# Altium footprint library ICs_VendorSpecific.PcbLib: 247 footprints (part 8 of 19)
Each footprint in its own frame and in the unit in brackets; x right, y up, seen from the top. Pads: shape width x height; smd on the part's side, far side on the other; paste and mask are expansions set on the pad; w line width, h text height; cw(c..) or ccw(c..) is an arc to the next point about the centre after c.
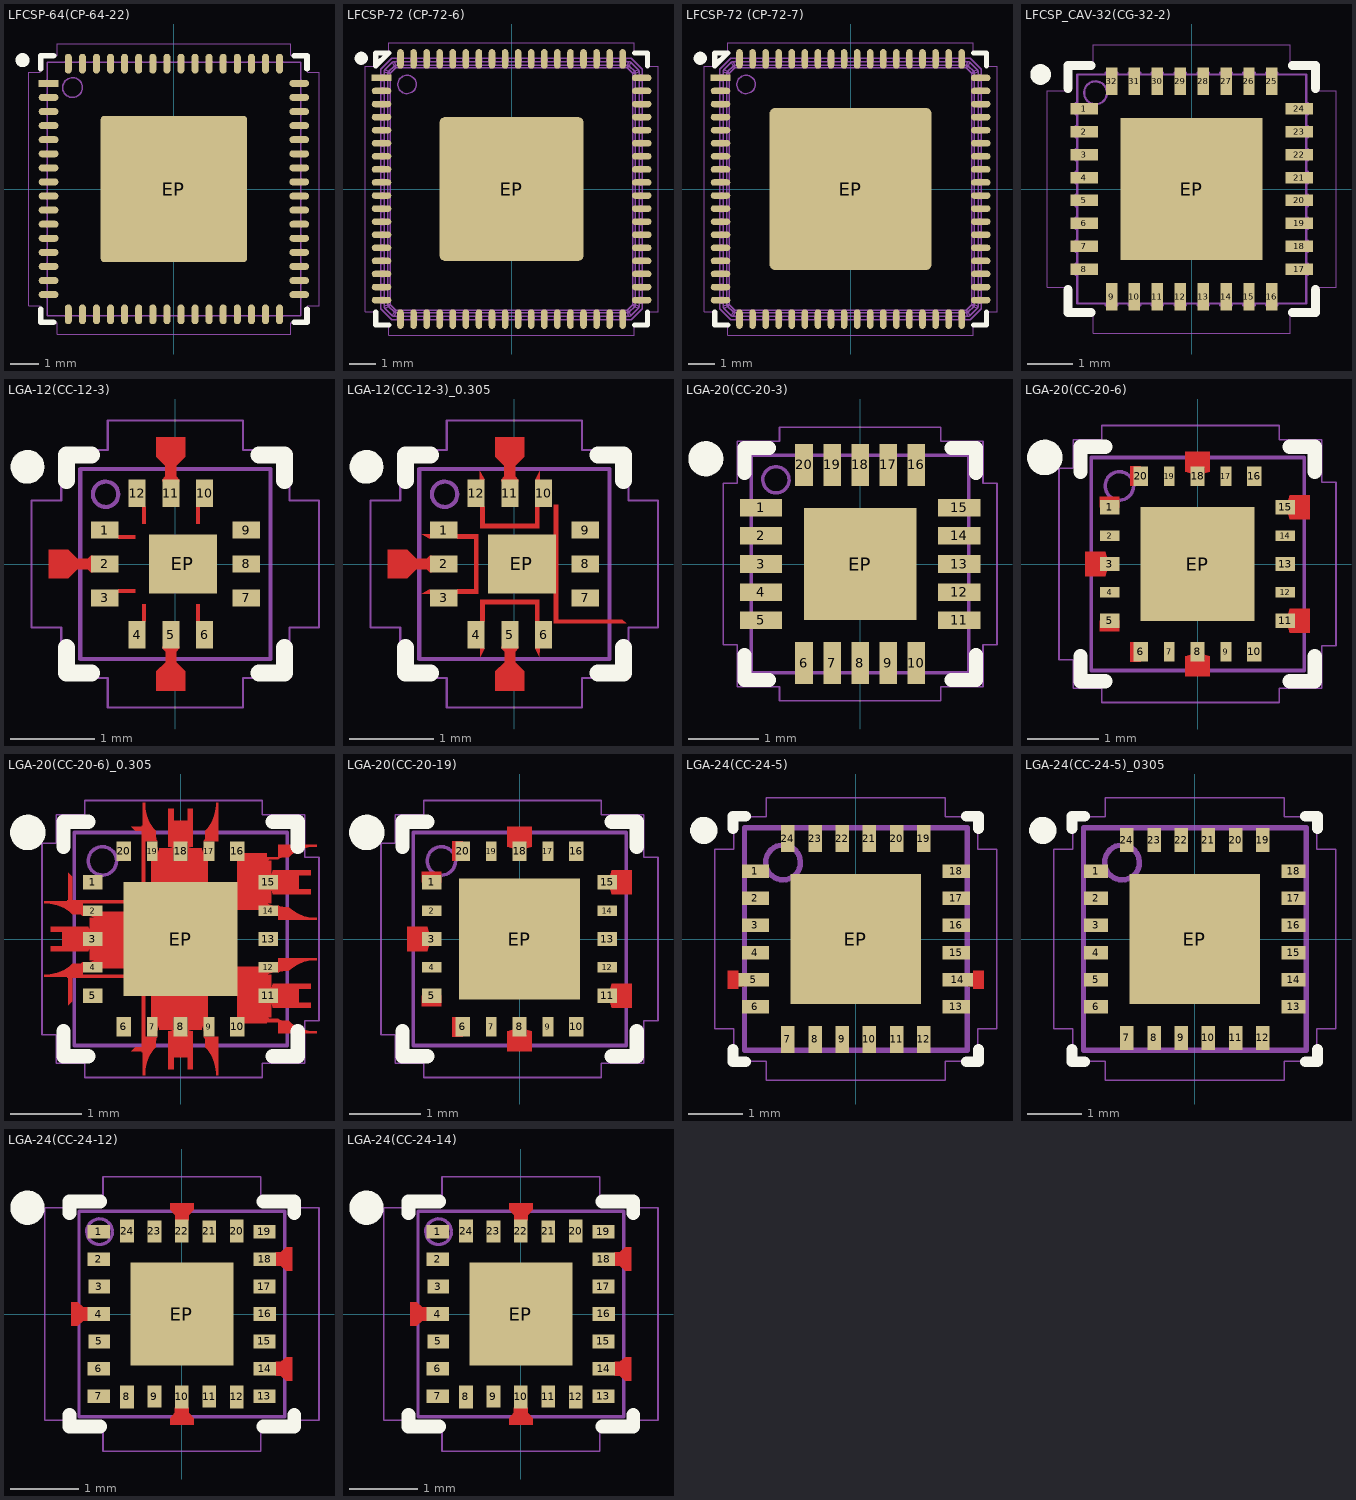
[diagram p7: the footprints below, top view; thin cyan lines are the x and y axes]

## LFCSP-64(CP-64-22) [mm] "QFN, 64-Leads, Body 9x9mm, Pitch 0.50mm, Thermal Pad 5.21x5.21mm"
height 0.75
pads (65):
  rect 0.7x0.25 smd paste+0 mask+0.05: 1(-4.45,3.75)
  oval 0.7x0.25 smd paste+0 mask+0.05: 2(-4.45,3.25) 3(-4.45,2.75) 4(-4.45,2.25) 5(-4.45,1.75) 6(-4.45,1.25) 7(-4.45,0.75) 8(-4.45,0.25) 9(-4.45,-0.25) 10(-4.45,-0.75) 11(-4.45,-1.25) 12(-4.45,-1.75) 13(-4.45,-2.25) 14(-4.45,-2.75) 15(-4.45,-3.25) 16(-4.45,-3.75) 33(4.45,-3.75) 34(4.45,-3.25) 35(4.45,-2.75) 36(4.45,-2.25) 37(4.45,-1.75) 38(4.45,-1.25) 39(4.45,-0.75) 40(4.45,-0.25) 41(4.45,0.25) 42(4.45,0.75) 43(4.45,1.25) 44(4.45,1.75) 45(4.45,2.25) 46(4.45,2.75) 47(4.45,3.25) 48(4.45,3.75)
  oval 0.25x0.7 smd paste+0 mask+0.05: 17(-3.75,-4.45) 18(-3.25,-4.45) 19(-2.75,-4.45) 20(-2.25,-4.45) 21(-1.75,-4.45) 22(-1.25,-4.45) 23(-0.75,-4.45) 24(-0.25,-4.45) 25(0.25,-4.45) 26(0.75,-4.45) 27(1.25,-4.45) 28(1.75,-4.45) 29(2.25,-4.45) 30(2.75,-4.45) 31(3.25,-4.45) 32(3.75,-4.45) 49(3.75,4.45) 50(3.25,4.45) 51(2.75,4.45) 52(2.25,4.45) 53(1.75,4.45) 54(1.25,4.45) 55(0.75,4.45) 56(0.25,4.45) 57(-0.25,4.45) 58(-0.75,4.45) 59(-1.25,4.45) 60(-1.75,4.45) 61(-2.25,4.45) 62(-2.75,4.45) 63(-3.25,4.45) 64(-3.75,4.45)
  rrect5% 5.2x5.2 smd paste-50 mask+0.05: EP(0,0)
Top Overlay:
  circle w0.25: c-5.375,4.575 r0.125
  lines w0.2: -4.725,-4.275 -4.725,-4.725 -4.275,-4.725 ; -4.725,4.275 -4.725,4.725 -4.275,4.725 ; 4.275,-4.725 4.725,-4.725 4.725,-4.275 ; 4.275,4.725 4.725,4.725 4.725,4.275
Top Paste:
  region: -2.45,2.45 -2.45,1.45 -1.45,1.45 -1.45,2.45
  region: -2.45,-1.45 -2.45,-2.45 -1.45,-2.45 -1.45,-1.45
  region: -1.15,-1.45 -1.15,-2.45 -0.15,-2.45 -0.15,-1.45
  region: 0.15,-1.45 0.15,-2.45 1.15,-2.45 1.15,-1.45
  region: 1.45,-1.45 1.45,-2.45 2.45,-2.45 2.45,-1.45
  region: -1.15,2.45 -1.15,1.45 -0.15,1.45 -0.15,2.45
  region: 0.15,2.45 0.15,1.45 1.15,1.45 1.15,2.45
  region: 1.45,2.45 1.45,1.45 2.45,1.45 2.45,2.45
  region: -2.45,1.15 -2.45,0.15 -1.45,0.15 -1.45,1.15
  region: -1.15,1.15 -1.15,0.15 -0.15,0.15 -0.15,1.15
  region: 0.15,1.15 0.15,0.15 1.15,0.15 1.15,1.15
  region: 1.45,1.15 1.45,0.15 2.45,0.15 2.45,1.15
  region: -2.45,-0.15 -2.45,-1.15 -1.45,-1.15 -1.45,-0.15
  region: -1.15,-0.15 -1.15,-1.15 -0.15,-1.15 -0.15,-0.15
  region: 0.15,-0.15 0.15,-1.15 1.15,-1.15 1.15,-0.15
  region: 1.45,-0.15 1.45,-1.15 2.45,-1.15 2.45,-0.15
Top Courtyard:
  lines w0.025: -5.15,-4.15 -4.75,-4.15 -4.75,-4.75 -4.15,-4.75 -4.15,-5.15 4.15,-5.15 4.15,-4.75 4.75,-4.75 4.75,-4.15 5.15,-4.15 5.15,4.15 4.75,4.15 4.75,4.75 4.15,4.75 4.15,5.15 -4.15,5.15 -4.15,4.75 -4.75,4.75 -4.75,4.15 -5.15,4.15 -5.15,-4.15
Top Assembly:
  drawing of 197 lines, arcs and shapes, not listed
  text ".Designator" at -6.763,-0.679 h3
3D body "LFCSP_64_AD9912_CP_64_22.x_t": height 0.77, standoff 0, extent -4.52,-4.52 4.52,4.52

## LFCSP-72 (CP-72-6) [mm] "LFCSP, 72-Leads, Body 10x10mm, Pitch 0.50mm, Thermal Pad 5.30x5.30mm. Compliant to JEDEC standards MO-220-VNND-4"
height 1
pads (73):
  rect 0.75x0.25 smd mask+0.05: 1(-4.975,4.25)
  oval 0.75x0.25 smd mask+0.05: 2(-4.975,3.75) 3(-4.975,3.25) 4(-4.975,2.75) 5(-4.975,2.25) 6(-4.975,1.75) 7(-4.975,1.25) 8(-4.975,0.75) 9(-4.975,0.25) 10(-4.975,-0.25) 11(-4.975,-0.75) 12(-4.975,-1.25) 13(-4.975,-1.75) 14(-4.975,-2.25) 15(-4.975,-2.75) 16(-4.975,-3.25) 17(-4.975,-3.75) 18(-4.975,-4.25) 37(4.975,-4.25) 38(4.975,-3.75) 39(4.975,-3.25) 40(4.975,-2.75) 41(4.975,-2.25) 42(4.975,-1.75) 43(4.975,-1.25) 44(4.975,-0.75) 45(4.975,-0.25) 46(4.975,0.25) 47(4.975,0.75) 48(4.975,1.25) 49(4.975,1.75) 50(4.975,2.25) 51(4.975,2.75) 52(4.975,3.25) 53(4.975,3.75) 54(4.975,4.25)
  oval 0.25x0.75 smd mask+0.05: 19(-4.25,-4.975) 20(-3.75,-4.975) 21(-3.25,-4.975) 22(-2.75,-4.975) 23(-2.25,-4.975) 24(-1.75,-4.975) 25(-1.25,-4.975) 26(-0.75,-4.975) 27(-0.25,-4.975) 28(0.25,-4.975) 29(0.75,-4.975) 30(1.25,-4.975) 31(1.75,-4.975) 32(2.25,-4.975) 33(2.75,-4.975) 34(3.25,-4.975) 35(3.75,-4.975) 36(4.25,-4.975) 55(4.25,4.975) 56(3.75,4.975) 57(3.25,4.975) 58(2.75,4.975) 59(2.25,4.975) 60(1.75,4.975) 61(1.25,4.975) 62(0.75,4.975) 63(0.25,4.975) 64(-0.25,4.975) 65(-0.75,4.975) 66(-1.25,4.975) 67(-1.75,4.975) 68(-2.25,4.975) 69(-2.75,4.975) 70(-3.25,4.975) 71(-3.75,4.975) 72(-4.25,4.975)
  rrect7% 5.5x5.5 smd paste-4 mask+0.05: EP(0,0)
Top Overlay:
  circle w0.25: c-5.75,5 r0.125
  lines w0.2: -5.2,-4.7 -5.2,-5.2 -4.7,-5.2 ; 4.7,-5.2 5.2,-5.2 5.2,-4.7 ; 4.7,5.2 5.2,5.2 5.2,4.7 ; -5.2,4.7 -5.2,5.2 -4.7,5.2 -5.2,4.7
Top Paste:
  region: 2.45,-1.45 1.45,-1.45 1.45,-2.45 2.45,-2.45
  region: 1.15,-1.45 0.15,-1.45 0.15,-2.45 1.15,-2.45
  region: -0.15,-1.45 -1.15,-1.45 -1.15,-2.45 -0.15,-2.45
  region: -1.45,-1.45 -2.45,-1.45 -2.45,-2.45 -1.45,-2.45
  region: 2.45,2.45 1.45,2.45 1.45,1.45 2.45,1.45
  region: 1.15,2.45 0.15,2.45 0.15,1.45 1.15,1.45
  region: -0.15,2.45 -1.15,2.45 -1.15,1.45 -0.15,1.45
  region: -1.45,2.45 -2.45,2.45 -2.45,1.45 -1.45,1.45
  region: 2.45,1.15 1.45,1.15 1.45,0.15 2.45,0.15
  region: 1.15,1.15 0.15,1.15 0.15,0.15 1.15,0.15
  region: -0.15,1.15 -1.15,1.15 -1.15,0.15 -0.15,0.15
  region: -1.45,1.15 -2.45,1.15 -2.45,0.15 -1.45,0.15
  region: 2.45,-0.15 1.45,-0.15 1.45,-1.15 2.45,-1.15
  region: -1.45,-0.15 -2.45,-0.15 -2.45,-1.15 -1.45,-1.15
  region: -0.15,-0.15 -1.15,-0.15 -1.15,-1.15 -0.15,-1.15
  region: 1.15,-0.15 0.15,-0.15 0.15,-1.15 1.15,-1.15
Top Courtyard:
  lines w0.025: -5.6,-4.7 -5.6,4.7 -5.2,4.7 -5.2,5.2 -4.7,5.2 -4.7,5.6 4.7,5.6 4.7,5.2 5.2,5.2 5.2,4.7 5.6,4.7 5.6,-4.7 5.2,-4.7 5.2,-5.2 4.7,-5.2 4.7,-5.6 -4.7,-5.6 -4.7,-5.2 -5.2,-5.2 -5.2,-4.7 -5.6,-4.7
Top Assembly:
  drawing of 369 lines, arcs and shapes, not listed
  text ".Designator" at -6.763,-0.679 h3
3D body "LFCSP-72(CP-72-6)_X_T.x_t": height 1.04, standoff 0, extent -5.005,-5.005 5.005,5.005

## LFCSP-72 (CP-72-7) [mm] "LFCSP, 72-Leads, Body 10x10mm, Pitch 0.50mm, Thermal Pad 5.30x5.30mm. Compliant to JEDEC standards MO-220-VNND-4"
height 1
pads (73):
  rect 0.75x0.25 smd mask+0.05: 1(-4.975,4.25)
  oval 0.75x0.25 smd mask+0.05: 2(-4.975,3.75) 3(-4.975,3.25) 4(-4.975,2.75) 5(-4.975,2.25) 6(-4.975,1.75) 7(-4.975,1.25) 8(-4.975,0.75) 9(-4.975,0.25) 10(-4.975,-0.25) 11(-4.975,-0.75) 12(-4.975,-1.25) 13(-4.975,-1.75) 14(-4.975,-2.25) 15(-4.975,-2.75) 16(-4.975,-3.25) 17(-4.975,-3.75) 18(-4.975,-4.25) 37(4.975,-4.25) 38(4.975,-3.75) 39(4.975,-3.25) 40(4.975,-2.75) 41(4.975,-2.25) 42(4.975,-1.75) 43(4.975,-1.25) 44(4.975,-0.75) 45(4.975,-0.25) 46(4.975,0.25) 47(4.975,0.75) 48(4.975,1.25) 49(4.975,1.75) 50(4.975,2.25) 51(4.975,2.75) 52(4.975,3.25) 53(4.975,3.75) 54(4.975,4.25)
  oval 0.25x0.75 smd mask+0.05: 19(-4.25,-4.975) 20(-3.75,-4.975) 21(-3.25,-4.975) 22(-2.75,-4.975) 23(-2.25,-4.975) 24(-1.75,-4.975) 25(-1.25,-4.975) 26(-0.75,-4.975) 27(-0.25,-4.975) 28(0.25,-4.975) 29(0.75,-4.975) 30(1.25,-4.975) 31(1.75,-4.975) 32(2.25,-4.975) 33(2.75,-4.975) 34(3.25,-4.975) 35(3.75,-4.975) 36(4.25,-4.975) 55(4.25,4.975) 56(3.75,4.975) 57(3.25,4.975) 58(2.75,4.975) 59(2.25,4.975) 60(1.75,4.975) 61(1.25,4.975) 62(0.75,4.975) 63(0.25,4.975) 64(-0.25,4.975) 65(-0.75,4.975) 66(-1.25,4.975) 67(-1.75,4.975) 68(-2.25,4.975) 69(-2.75,4.975) 70(-3.25,4.975) 71(-3.75,4.975) 72(-4.25,4.975)
  rrect7% 6.2x6.2 smd paste-4 mask+0.05: EP(0,0)
Top Overlay:
  circle w0.25: c-5.75,5 r0.125
  lines w0.2: -5.2,-4.7 -5.2,-5.2 -4.7,-5.2 ; 4.7,-5.2 5.2,-5.2 5.2,-4.7 ; 4.7,5.2 5.2,5.2 5.2,4.7 ; -5.2,4.7 -4.7,5.2 -5.2,5.2 -5.2,4.7
Top Paste:
  region: 2.6,-1.8 1.8,-1.8 1.8,-2.6 2.6,-2.6
  region: -1.8,-1.8 -2.6,-1.8 -2.6,-2.6 -1.8,-2.6
  region: -0.7,-1.8 -1.5,-1.8 -1.5,-2.6 -0.7,-2.6
  region: 0.4,-1.8 -0.4,-1.8 -0.4,-2.6 0.4,-2.6
  region: 1.5,-1.8 0.7,-1.8 0.7,-2.6 1.5,-2.6
  region: -1.8,2.6 -2.6,2.6 -2.6,1.8 -1.8,1.8
  region: -0.7,2.6 -1.5,2.6 -1.5,1.8 -0.7,1.8
  region: 2.6,2.6 1.8,2.6 1.8,1.8 2.6,1.8
  region: 0.4,2.6 -0.4,2.6 -0.4,1.8 0.4,1.8
  region: 1.5,2.6 0.7,2.6 0.7,1.8 1.5,1.8
  region: -1.8,1.5 -2.6,1.5 -2.6,0.7 -1.8,0.7
  region: -0.7,1.5 -1.5,1.5 -1.5,0.7 -0.7,0.7
  region: 2.6,1.5 1.8,1.5 1.8,0.7 2.6,0.7
  region: 0.4,1.5 -0.4,1.5 -0.4,0.7 0.4,0.7
  region: 1.5,1.5 0.7,1.5 0.7,0.7 1.5,0.7
  region: -1.8,0.4 -2.6,0.4 -2.6,-0.4 -1.8,-0.4
  region: -0.7,0.4 -1.5,0.4 -1.5,-0.4 -0.7,-0.4
  region: 2.6,0.4 1.8,0.4 1.8,-0.4 2.6,-0.4
  region: 2.6,-0.7 1.8,-0.7 1.8,-1.5 2.6,-1.5
  region: -1.8,-0.7 -2.6,-0.7 -2.6,-1.5 -1.8,-1.5
  region: -0.7,-0.7 -1.5,-0.7 -1.5,-1.5 -0.7,-1.5
  region: 0.4,0.4 -0.4,0.4 -0.4,-0.4 0.4,-0.4
  region: 1.5,0.4 0.7,0.4 0.7,-0.4 1.5,-0.4
  region: 0.4,-0.7 -0.4,-0.7 -0.4,-1.5 0.4,-1.5
  region: 1.5,-0.7 0.7,-0.7 0.7,-1.5 1.5,-1.5
Top Courtyard:
  lines w0.025: -5.6,-4.7 -5.2,-4.7 -5.2,-5.2 -4.7,-5.2 -4.7,-5.6 4.7,-5.6 4.7,-5.2 5.2,-5.2 5.2,-4.7 5.6,-4.7 5.6,4.7 5.2,4.7 5.2,5.2 4.7,5.2 4.7,5.6 -4.7,5.6 -4.7,5.2 -5.2,5.2 -5.2,4.7 -5.6,4.7 -5.6,-4.7
Top Assembly:
  drawing of 369 lines, arcs and shapes, not listed
  text ".Designator" at -6.763,-0.679 h3
3D body "LFCSP-72(CP-72-7).x_t": height 1.04, standoff 0, extent -5.005,-5.005 5.005,5.005

## LFCSP_CAV-32(CG-32-2) [mm] "QFN, 32-Leads, Body 5x5mm, Pitch 0.50mm, Thermal Pad 3.10x3.10mm"
height 1.35
pads (33):
  rect 0.6x0.25 smd mask+0.07: 1(-2.345,1.75) 2(-2.345,1.25) 3(-2.345,0.75) 4(-2.345,0.25) 5(-2.345,-0.25) 6(-2.345,-0.75) 7(-2.345,-1.25) 8(-2.345,-1.75) 17(2.35,-1.75) 18(2.35,-1.25) 19(2.35,-0.75) 20(2.35,-0.25) 21(2.35,0.25) 22(2.35,0.75) 23(2.35,1.25) 24(2.35,1.75)
  rect 0.25x0.6 smd mask+0.07: 9(-1.75,-2.35) 10(-1.25,-2.35) 11(-0.75,-2.35) 12(-0.25,-2.35) 13(0.25,-2.35) 14(0.75,-2.35) 15(1.25,-2.35) 16(1.75,-2.35) 25(1.75,2.35) 26(1.25,2.35) 27(0.75,2.35) 28(0.25,2.35) 29(-0.25,2.35) 30(-0.75,2.35) 31(-1.25,2.35) 32(-1.75,2.35)
  rect 3.1x3.1 smd paste-5 mask+0.08: EP(0,0)
Top Overlay:
  circle w0.25: c-3.3,2.5 r0.1
  lines w0.2: -2.7,-2.2 -2.7,-2.7 -2.2,-2.7 ; -2.7,2.2 -2.7,2.7 -2.2,2.7 ; 2.2,-2.7 2.7,-2.7 2.7,-2.2 ; 2.2,2.7 2.7,2.7 2.7,2.2
Top Paste:
  region: 0.6,-0.6 0.6,-1.4 1.4,-1.4 1.4,-0.6
  region: -0.4,-0.6 -0.4,-1.4 0.4,-1.4 0.4,-0.6
  region: -1.4,-0.6 -1.4,-1.4 -0.6,-1.4 -0.6,-0.6
  rectangle: 0.6,-0.4 1.4,0.4
  rectangle: 0.6,0.6 1.4,1.4
  rectangle: -0.4,0.6 0.4,1.4
  rectangle: -1.4,0.6 -0.6,1.4
  rectangle: -1.4,-0.4 -0.6,0.4
  rectangle: -0.4,-0.4 0.4,0.4
Top Courtyard:
  lines w0.025: -3.15,-2.15 -2.7,-2.15 -2.7,-2.7 -2.15,-2.7 -2.15,-3.15 2.15,-3.15 2.15,-2.7 2.7,-2.7 2.7,-2.15 3.15,-2.15 3.15,2.15 2.7,2.15 2.7,2.7 2.15,2.7 2.15,3.15 -2.15,3.15 -2.15,2.7 -2.7,2.7 -2.7,2.15 -3.15,2.15 -3.15,-2.15
Top Assembly:
  drawing of 165 lines, arcs and shapes, not listed
  text ".Designator" at -3.378,-0.339 h1.5
3D body "CG-32-2([LFCSP_CAV32).x_t": height 1.29, standoff 0, extent -2.535,-2.535 2.535,2.535

## LGA-12(CC-12-3) [mm] "LGA, 12-Leads, Body 2.25x2.25mm, Pitch 0.40mm, Thermal Pad 0.7x0.8mm"
height 0.75
pads (13):
  rect 0.325x0.2 smd paste+0.02 mask+0.04: 1(-0.837,0.4) 2(-0.837,0) 3(-0.837,-0.4) 7(0.837,-0.4) 8(0.837,0) 9(0.837,0.4)
  rect 0.2x0.325 smd paste+0.02 mask+0.04: 4(-0.453,-0.837) 5(-0.053,-0.837) 6(0.347,-0.837) 10(0.347,0.837) 11(-0.053,0.837) 12(-0.453,0.837)
  rect 0.8x0.7 smd paste-5 mask+0.07: EP(0.09,0)
Top Layer:
  region: -1.036,0 -1.036,-0.063 -1.163,-0.063 -1.163,0
  region: -1.036,0 -1.036,0.063 -1.163,0.063 -1.163,0
  region: -1,0.1 -1.036,0.063 -1.163,0.063 -1.163,-0.063 -1.036,-0.063 -1,-0.1 -0.981,-0.1 -0.981,0.1
  region: -1.163,0.063 -1.27,0.17 -1.5,0.17 -1.5,-0.17 -1.27,-0.17 -1.163,-0.063
  region: 0.047,0.999 0.01,1.036 0.01,1.163 -0.116,1.163 -0.116,1.036 -0.153,0.999 -0.153,0.98 0.047,0.98
  region: 0.01,1.163 0.117,1.27 0.117,1.5 -0.223,1.5 -0.223,1.269 -0.116,1.163
  region: -0.153,-1 -0.116,-1.036 -0.116,-1.163 0.01,-1.163 0.01,-1.036 0.047,-1 0.047,-0.981 -0.153,-0.981
  region: -0.116,-1.163 -0.223,-1.27 -0.223,-1.5 0.117,-1.5 0.117,-1.27 0.01,-1.163
  pour cut-out: -0.393,-0.675 -0.353,-0.675 -0.353,-0.475 -0.393,-0.475
  pour cut-out: 0.287,-0.675 0.247,-0.675 0.247,-0.475 0.287,-0.475
  pour cut-out: -0.675,-0.34 -0.675,-0.3 -0.475,-0.3 -0.475,-0.34
  pour cut-out: -0.675,0.34 -0.675,0.3 -0.475,0.3 -0.475,0.34
  pour cut-out: -0.393,0.675 -0.353,0.675 -0.353,0.475 -0.393,0.475
  pour cut-out: 0.287,0.675 0.247,0.675 0.247,0.475 0.287,0.475
Top Overlay:
  circle w0.2: c-1.75,1.15 r0.1
  lines w0.2: -1.29,-0.99 -1.29,-1.29 -0.99,-1.29 ; -1.29,0.99 -1.29,1.29 -0.99,1.29 ; 0.99,-1.29 1.29,-1.29 1.29,-0.99 ; 0.99,1.29 1.29,1.29 1.29,0.99
Top Paste:
  region: 0.495,0.09 0.185,0.09 0.185,0.35 0.495,0.35
  region: 0.495,-0.09 0.185,-0.09 0.185,-0.35 0.495,-0.35
  region: -0.315,0.09 -0.005,0.09 -0.005,0.35 -0.315,0.35
  region: -0.31,-0.09 0,-0.09 0,-0.35 -0.31,-0.35
Top Solder:
  region: -0.313,1.036 -0.313,1.27 -0.593,1.27 -0.593,1.036
  region: 0.087,1.036 0.087,1.27 -0.193,1.27 -0.193,1.036
  region: 0.487,1.036 0.487,1.27 0.207,1.27 0.207,1.036
  region: 1.036,0.26 1.27,0.26 1.27,0.54 1.036,0.54
  region: 1.036,-0.14 1.27,-0.14 1.27,0.14 1.036,0.14
  region: 1.036,-0.54 1.27,-0.54 1.27,-0.26 1.036,-0.26
  region: 0.207,-1.036 0.207,-1.27 0.487,-1.27 0.487,-1.036
  region: -0.193,-1.036 -0.193,-1.27 0.087,-1.27 0.087,-1.036
  region: -0.593,-1.036 -0.593,-1.27 -0.313,-1.27 -0.313,-1.036
  region: -1.036,-0.26 -1.27,-0.26 -1.27,-0.54 -1.036,-0.54
  region: -1.036,0.14 -1.27,0.14 -1.27,-0.14 -1.036,-0.14
  region: -1.036,0.54 -1.27,0.54 -1.27,0.26 -1.036,0.26
Top Courtyard:
  lines w0.025: -1.7,-0.75 -1.35,-0.75 -1.35,-1.35 -0.8,-1.35 -0.8,-1.7 0.8,-1.7 0.8,-1.35 1.35,-1.35 1.35,-0.75 1.7,-0.75 1.7,0.75 1.35,0.75 1.35,1.35 0.8,1.35 0.8,1.7 -0.8,1.7 -0.8,1.35 -1.35,1.35 -1.35,0.75 -1.7,0.75 -1.7,-0.75
Top Assembly:
  circle w0.05: c-0.825,0.825 r0.15
  lines w0.05: -1.125,-1.125 -1.125,1.125 1.125,1.125 1.125,-1.125 -1.125,-1.125
  text ".Designator" at -2.815,-0.283 h1.25
3D body "CC-12-3(LGA12).x_t": height 0.76, standoff 0, extent -1.125,-1.125 1.125,1.125

## LGA-12(CC-12-3)_0.305 [mm] "LGA, 12-Leads, Body 2.25x2.25mm, Pitch 0.40mm, Thermal Pad 0.7x0.8mm"
height 0.75
pads (13):
  rect 0.325x0.2 smd paste+0 mask+0.04: 1(-0.837,0.4) 2(-0.837,0) 3(-0.837,-0.4) 7(0.837,-0.4) 8(0.837,0) 9(0.837,0.4)
  rect 0.2x0.325 smd paste+0 mask+0.04: 4(-0.453,-0.837) 5(-0.053,-0.837) 6(0.347,-0.837) 10(0.347,0.837) 11(-0.053,0.837) 12(-0.453,0.837)
  rect 0.8x0.7 smd paste-5 mask+0.07: EP(0.09,0)
Top Layer:
  region: -1,-0.3 -1.095,-0.35 -1,-0.351
  region: -1,0.3 -1.095,0.35 -1,0.351
  region: -0.353,-0.999 -0.403,-1.095 -0.404,-0.999
  region: 0.247,-0.999 0.297,-1.095 0.298,-0.999
  region: -0.407,1.098 -0.407,0.999 -0.353,0.999 -0.403,1.094
  region: 0.301,1.098 0.301,0.999 0.247,0.999 0.297,1.094
  region: -0.674,0.35 -0.425,0.35 -0.425,-0.35 -0.674,-0.35 -0.674,-0.34 -0.475,-0.34 -0.475,0.34 -0.674,0.34
  region: -0.403,-0.674 -0.403,-0.424 0.297,-0.424 0.297,-0.674 0.287,-0.674 0.287,-0.475 -0.393,-0.475 -0.393,-0.674
  region: -0.403,0.674 -0.403,0.424 0.297,0.424 0.297,0.674 0.287,0.674 0.287,0.475 -0.393,0.475 -0.393,0.674
  region: 1.322,-0.701 0.468,-0.701 0.467,-0.7 0.467,0.7 0.517,0.7 0.517,-0.657 1.279,-0.657
  pour cut-out: -0.353,0.675 -0.353,0.475 -0.393,0.475 -0.393,0.675
  pour cut-out: 0.247,0.675 0.287,0.675 0.287,0.475 0.247,0.475
  pour cut-out: 0.287,-0.475 0.287,-0.674 0.247,-0.674 0.247,-0.675 0.247,-0.475
  pour cut-out: -0.353,-0.475 -0.353,-0.675 -0.393,-0.675 -0.393,-0.475
  pour cut-out: -0.674,-0.34 -0.674,-0.3 -0.675,-0.3 -0.475,-0.3 -0.475,-0.34
  pour cut-out: -0.675,0.3 -0.675,0.34 -0.475,0.34 -0.475,0.3
  region: -0.153,-0.98 -0.153,-0.999 -0.116,-1.036 -0.116,-1.163 -0.223,-1.27 -0.223,-1.5 0.117,-1.5 0.117,-1.269 0.01,-1.163 0.01,-1.036 0.047,-0.999 0.047,-0.98
  region: -1.5,0.17 -1.5,-0.17 -1.27,-0.17 -1.163,-0.063 -1.036,-0.063 -1,-0.1 -0.981,-0.1 -0.981,0.1 -1,0.1 -1.036,0.063 -1.163,0.063 -1.27,0.17
  region: -0.153,0.98 -0.153,0.999 -0.116,1.036 -0.116,1.163 -0.223,1.269 -0.223,1.5 0.117,1.5 0.117,1.27 0.01,1.163 0.01,1.036 0.047,0.999 0.047,0.98
Top Overlay:
  circle w0.2: c-1.75,1.15 r0.1
  lines w0.2: -1.29,-0.99 -1.29,-1.29 -0.99,-1.29 ; -1.29,0.99 -1.29,1.29 -0.99,1.29 ; 0.99,-1.29 1.29,-1.29 1.29,-0.99 ; 0.99,1.29 1.29,1.29 1.29,0.99
Top Paste:
  region: -0.31,0.1 -0.01,0.1 -0.01,0.35 -0.31,0.35
  region: 0.49,0.1 0.19,0.1 0.19,0.35 0.49,0.35
  region: 0.49,-0.1 0.19,-0.1 0.19,-0.35 0.49,-0.35
  region: -0.31,-0.1 -0.01,-0.1 -0.01,-0.35 -0.31,-0.35
Top Courtyard:
  lines w0.025: -1.7,-0.75 -1.35,-0.75 -1.35,-1.35 -0.8,-1.35 -0.8,-1.7 0.8,-1.7 0.8,-1.35 1.35,-1.35 1.35,-0.75 1.7,-0.75 1.7,0.75 1.35,0.75 1.35,1.35 0.8,1.35 0.8,1.7 -0.8,1.7 -0.8,1.35 -1.35,1.35 -1.35,0.75 -1.7,0.75 -1.7,-0.75
Top Assembly:
  circle w0.05: c-0.825,0.825 r0.15
  lines w0.05: -1.125,-1.125 -1.125,1.125 1.125,1.125 1.125,-1.125 -1.125,-1.125
  text ".Designator" at -2.815,-0.282 h1.25
3D body "CC-12-3(LGA12).x_t": height 0.76, standoff 0, extent -1.125,-1.125 1.125,1.125

## LGA-20(CC-20-3) [mm] "LGA, 20-Leads, Body 3x3mm, Pitch 0.40mm, Thermal Pad 1.60x1.60mm"
height 0.726
pads (21):
  rect 0.6x0.25 smd mask+0.03: 1(-1.412,0.8) 2(-1.412,0.4) 3(-1.412,0) 4(-1.412,-0.4) 5(-1.412,-0.8) 11(1.412,-0.8) 12(1.412,-0.4) 13(1.412,0) 14(1.412,0.4) 15(1.412,0.8)
  rect 0.25x0.6 smd mask+0.03: 6(-0.8,-1.412) 7(-0.4,-1.412) 8(0,-1.412) 9(0.4,-1.412) 10(0.8,-1.412) 16(0.8,1.412) 17(0.4,1.412) 18(0,1.412) 19(-0.4,1.412) 20(-0.8,1.412)
  rect 1.6x1.6 smd paste-4 mask+0.05: EP(0,0)
Top Overlay:
  circle w0.25: c-2.2,1.5 r0.125
  lines w0.2: -1.65,-1.3 -1.65,-1.65 -1.3,-1.65 ; -1.65,1.3 -1.65,1.65 -1.3,1.65 ; 1.3,-1.65 1.65,-1.65 1.65,-1.3 ; 1.3,1.65 1.65,1.65 1.65,1.3
Top Paste:
  rectangle: -0.7,0.1 -0.1,0.7
  rectangle: 0.1,0.1 0.7,0.7
  rectangle: -0.7,-0.7 -0.1,-0.1
  rectangle: 0.1,-0.7 0.7,-0.1
Top Courtyard:
  lines w0.025: -1.95,-1.15 -1.95,1.15 -1.75,1.15 -1.75,1.75 -1.15,1.75 -1.15,1.95 1.15,1.95 1.15,1.75 1.75,1.75 1.75,1.15 1.95,1.15 1.95,-1.15 1.75,-1.15 1.75,-1.75 1.15,-1.75 1.15,-1.95 -1.15,-1.95 -1.15,-1.75 -1.75,-1.75 -1.75,-1.15 -1.95,-1.15
Top Assembly:
  lines w0.05: -1.014,1.221 ccw(c-1.2,1.2) -1.013,1.19 ; -1.55,-1.55 1.55,-1.55 1.55,1.55 -1.55,1.55 -1.55,-1.55
  text ".Designator" at -4.511,-0.453 h2
3D body "CC-20-3(LGA20).x_t": height 0.73, standoff -0.01, extent -1.5,-1.5 1.5,1.5

## LGA-20(CC-20-6) [mm] "LGA, 20-Leads, Body 3x3mm, Pitch 0.40mm, Thermal Pad 1.50x1.50mm"
height 0.96
pads (21):
  rect 0.275x0.2 smd paste+0.01 mask+0.05: 1(-1.237,0.8) 3(-1.237,0) 5(-1.237,-0.8) 11(1.237,-0.8) 13(1.237,0) 15(1.237,0.8)
  rect 0.275x0.15 smd paste+0.01 mask+0.05: 2(-1.237,0.4) 4(-1.237,-0.4) 12(1.237,-0.4) 14(1.237,0.4)
  rect 0.2x0.275 smd paste+0.01 mask+0.05: 6(-0.8,-1.237) 8(0,-1.237) 10(0.8,-1.237) 16(0.8,1.237) 18(0,1.237) 20(-0.8,1.237)
  rect 0.15x0.275 smd paste+0.01 mask+0.05: 7(-0.4,-1.237) 9(0.4,-1.237) 17(0.4,1.237) 19(-0.4,1.237)
  rect 1.6x1.6 smd paste-4 mask+0.05: EP(0,0)
Top Layer:
  region: 1.58,0.689 1.354,0.689 1.354,0.921 1.58,0.921
  region: 1.58,-0.911 1.354,-0.911 1.354,-0.679 1.58,-0.679
  region: -0.111,-1.58 -0.111,-1.354 0.121,-1.354 0.121,-1.58
  region: -1.58,0.111 -1.354,0.111 -1.354,-0.121 -1.58,-0.121
  region: -0.099,1.58 -0.099,1.277 -0.17,1.301 -0.17,1.58
  region: 0.111,1.58 0.111,1.354 -0.121,1.354 -0.121,1.58
  region: 0.099,1.58 0.099,1.277 0.17,1.301 0.17,1.58
  region: 1.58,0.899 1.277,0.899 1.301,0.97 1.58,0.97
  region: 1.58,0.701 1.277,0.701 1.301,0.63 1.58,0.63
  region: 1.58,-0.701 1.277,-0.701 1.301,-0.63 1.58,-0.63
  region: 1.58,-0.899 1.277,-0.899 1.301,-0.97 1.58,-0.97
  region: 0.099,-1.58 0.099,-1.277 0.17,-1.301 0.17,-1.58
  region: -0.099,-1.58 -0.099,-1.277 -0.17,-1.301 -0.17,-1.58
  region: -1.58,-0.099 -1.277,-0.099 -1.301,-0.17 -1.58,-0.17
  region: -1.58,0.099 -1.277,0.099 -1.301,0.17 -1.58,0.17
  region: -1.1,0.8 -1.375,0.8 -1.375,0.947 -1.1,0.947
  region: -1.099,-0.8 -1.375,-0.8 -1.374,-0.947 -1.1,-0.947
  region: -0.8,-1.375 -0.8,-1.099 -0.947,-1.1 -0.947,-1.374
  region: -0.8,1.099 -0.8,1.375 -0.947,1.374 -0.947,1.1
Top Overlay:
  circle w0.25: c-2.15,1.5 r0.125
  lines w0.2: -1.65,-1.3 -1.65,-1.65 -1.3,-1.65 ; -1.65,1.3 -1.65,1.65 -1.3,1.65 ; 1.3,-1.65 1.65,-1.65 1.65,-1.3 ; 1.3,1.65 1.65,1.65 1.65,1.3
Top Paste:
  drawing of 90 lines, arcs and shapes, not listed
Top Solder:
  region: -1.354,0.525 -1.354,0.275 -1.65,0.275 -1.65,0.525
  region: -1.354,-0.65 -1.354,-0.95 -1.65,-0.95 -1.65,-0.65
  region: -1.354,-0.275 -1.354,-0.525 -1.65,-0.525 -1.65,-0.275
  region: -0.95,-1.354 -0.65,-1.354 -0.65,-1.65 -0.95,-1.65
  region: -0.525,-1.354 -0.275,-1.354 -0.275,-1.65 -0.525,-1.65
  region: -0.15,-1.354 0.15,-1.354 0.15,-1.65 -0.15,-1.65
  region: 0.275,-1.354 0.525,-1.354 0.525,-1.65 0.275,-1.65
  region: 0.65,-1.354 0.95,-1.354 0.95,-1.65 0.65,-1.65
  region: -1.354,0.95 -1.354,0.65 -1.65,0.65 -1.65,0.95
  region: -1.65,0.95 -1.65,1.15 -1.35,1.15 -1.35,0.95
  region: -1.65,-0.95 -1.65,-1.15 -1.35,-1.15 -1.35,-0.95
  region: -0.932,-1.65 -1.132,-1.65 -1.132,-1.35 -0.932,-1.35
  region: -1.354,0.15 -1.354,-0.15 -1.65,-0.15 -1.65,0.15
  region: 1.354,-0.15 1.354,0.15 1.65,0.15 1.65,-0.15
  region: 1.354,-0.95 1.354,-0.65 1.65,-0.65 1.65,-0.95
  region: 1.354,-0.525 1.354,-0.275 1.65,-0.275 1.65,-0.525
  region: 1.354,0.275 1.354,0.525 1.65,0.525 1.65,0.275
  region: 1.354,0.65 1.354,0.95 1.65,0.95 1.65,0.65
  region: 0.15,1.354 -0.15,1.354 -0.15,1.65 0.15,1.65
  region: 0.95,1.354 0.65,1.354 0.65,1.65 0.95,1.65
  region: -0.65,1.354 -0.95,1.354 -0.95,1.65 -0.65,1.65
  region: -0.932,1.65 -1.132,1.65 -1.132,1.35 -0.932,1.35
  region: 0.525,1.354 0.275,1.354 0.275,1.65 0.525,1.65
  region: -0.275,1.354 -0.525,1.354 -0.525,1.65 -0.275,1.65
Top Courtyard:
  lines w0.025: -1.95,-1.35 -1.75,-1.35 -1.75,-1.75 -1.35,-1.75 -1.35,-1.95 1.15,-1.95 1.15,-1.75 1.75,-1.75 1.75,-1.15 1.95,-1.15 1.95,1.15 1.75,1.15 1.75,1.75 1.15,1.75 1.15,1.95 -1.35,1.95 -1.35,1.75 -1.75,1.75 -1.75,1.35 -1.95,1.35 -1.95,-1.35
Top Assembly:
  circle w0.05: c-1.1,1.1 r0.2
  lines w0.05: -1.5,-1.5 1.5,-1.5 1.5,1.5 -1.5,1.5 -1.5,-1.5
  text ".Designator" at -4.511,-0.453 h2
3D body "CC-20-6(LGA20).x_t": height 0.86, standoff -0.01, extent -1.5,-1.5 1.5,1.5

## LGA-20(CC-20-6)_0.305 [mm] "LGA, 20-Leads, Body 3x3mm, Pitch 0.40mm, Thermal Pad 1.50x1.50mm"
height 0.96
pads (21):
  rect 0.275x0.2 smd paste+0.01 mask+0.05: 1(-1.237,0.8) 3(-1.237,0) 5(-1.237,-0.8) 11(1.237,-0.8) 13(1.237,0) 15(1.237,0.8)
  rect 0.275x0.15 smd paste+0.01 mask+0.05: 2(-1.237,0.4) 4(-1.237,-0.4) 12(1.237,-0.4) 14(1.237,0.4)
  rect 0.2x0.275 smd paste+0.01 mask+0.05: 6(-0.8,-1.237) 8(0,-1.237) 10(0.8,-1.237) 16(0.8,1.237) 18(0,1.237) 20(-0.8,1.237)
  rect 0.15x0.275 smd paste+0.01 mask+0.05: 7(-0.4,-1.237) 9(0.4,-1.237) 17(0.4,1.237) 19(-0.4,1.237)
  rect 1.6x1.6 smd paste-4 mask+0.05: EP(0,0)
Top Layer:
  region: 1.375,-1.33 1.375,-1.15 1.525,-1.15 1.562,-1.184 1.646,-1.239 1.739,-1.278 1.837,-1.298 1.887,-1.3 1.917,-1.3 1.917,-1.33 1.525,-1.33
  region: 0.325,-1.375 0.35,-1.374 0.355,-1.374 0.355,-1.445 0.35,-1.447 0.349,-1.438 0.345,-1.419 0.339,-1.4 0.33,-1.383
  region: -0.3,-1.217 -0.325,-1.217 -0.33,-1.217 -0.33,-1.288 -0.325,-1.29 -0.324,-1.28 -0.321,-1.261 -0.314,-1.243 -0.305,-1.225
  region: -0.325,-1.375 -0.35,-1.374 -0.355,-1.374 -0.355,-1.445 -0.35,-1.447 -0.349,-1.438 -0.346,-1.419 -0.339,-1.4 -0.33,-1.383
  region: 0.3,-1.217 0.325,-1.217 0.33,-1.217 0.33,-1.288 0.325,-1.29 0.324,-1.28 0.32,-1.261 0.314,-1.243 0.305,-1.225
  region: -0.53,-1.375 -0.35,-1.375 -0.35,-1.525 -0.384,-1.562 -0.44,-1.646 -0.478,-1.739 -0.498,-1.837 -0.5,-1.887 -0.5,-1.917 -0.53,-1.917 -0.53,-1.525
  region: 0.53,-1.375 0.35,-1.375 0.35,-1.525 0.384,-1.562 0.439,-1.646 0.478,-1.739 0.497,-1.837 0.5,-1.887 0.5,-1.917 0.53,-1.917 0.53,-1.525
  region: 1.375,-1.125 1.188,-1.125 1.188,-1.175 1.448,-1.175 1.448,-1.15 1.438,-1.149 1.419,-1.146 1.4,-1.139 1.383,-1.13
  region: 1.375,-0.27 1.375,-0.45 1.525,-0.45 1.562,-0.416 1.646,-0.36 1.739,-0.322 1.837,-0.302 1.887,-0.3 1.917,-0.3 1.917,-0.27 1.525,-0.27
  region: 1.217,-1.1 1.217,-1.125 1.217,-1.13 1.29,-1.13 1.29,-1.125 1.28,-1.124 1.261,-1.12 1.243,-1.114 1.225,-1.105
  region: 1.375,-0.475 1.374,-0.45 1.374,-0.445 1.445,-0.445 1.447,-0.45 1.438,-0.451 1.419,-0.455 1.4,-0.461 1.383,-0.47
  region: 1.217,-0.5 1.217,-0.475 1.217,-0.47 1.288,-0.47 1.29,-0.475 1.28,-0.476 1.261,-0.48 1.243,-0.486 1.225,-0.495
  region: 1.375,0.27 1.375,0.45 1.525,0.45 1.562,0.416 1.646,0.36 1.739,0.322 1.837,0.302 1.887,0.3 1.917,0.3 1.917,0.27 1.525,0.27
  region: 1.375,1.33 1.375,1.15 1.525,1.15 1.562,1.184 1.646,1.24 1.739,1.278 1.837,1.298 1.887,1.3 1.917,1.3 1.917,1.33 1.525,1.33
  region: 1.217,0.5 1.217,0.475 1.217,0.47 1.288,0.47 1.29,0.475 1.28,0.476 1.261,0.48 1.243,0.486 1.225,0.495
  region: 1.375,1.125 1.213,1.125 1.213,1.15 1.374,1.15 1.374,1.155 1.445,1.155 1.447,1.15 1.438,1.149 1.419,1.145 1.4,1.139 1.383,1.13
  region: 1.217,1.1 1.217,1.125 1.217,1.13 1.288,1.13 1.29,1.125 1.28,1.124 1.261,1.12 1.243,1.114 1.225,1.105
  region: 1.375,0.475 1.374,0.45 1.374,0.445 1.445,0.445 1.447,0.45 1.438,0.451 1.419,0.455 1.4,0.461 1.383,0.47
  region: 0.53,1.375 0.35,1.375 0.35,1.525 0.384,1.562 0.439,1.646 0.478,1.739 0.497,1.837 0.5,1.887 0.5,1.917 0.53,1.917 0.53,1.525
  region: -0.53,1.375 -0.35,1.375 -0.35,1.525 -0.384,1.562 -0.44,1.646 -0.478,1.739 -0.498,1.837 -0.5,1.887 -0.5,1.917 -0.53,1.917 -0.53,1.525
  region: 0.3,1.217 0.325,1.217 0.33,1.217 0.33,1.288 0.325,1.29 0.324,1.28 0.32,1.261 0.314,1.243 0.305,1.225
  region: -0.325,1.375 -0.35,1.374 -0.355,1.374 -0.355,1.445 -0.35,1.447 -0.349,1.438 -0.346,1.419 -0.339,1.4 -0.33,1.383
  region: -0.3,1.217 -0.325,1.217 -0.33,1.217 -0.33,1.288 -0.325,1.29 -0.324,1.28 -0.321,1.261 -0.314,1.243 -0.305,1.225
  region: 0.325,1.375 0.35,1.374 0.355,1.374 0.355,1.445 0.35,1.447 0.349,1.438 0.345,1.419 0.339,1.4 0.33,1.383
  region: -1.375,0.325 -1.374,0.35 -1.374,0.355 -1.445,0.355 -1.447,0.35 -1.438,0.349 -1.419,0.345 -1.4,0.339 -1.383,0.33
  region: -1.217,-0.3 -1.217,-0.325 -1.217,-0.33 -1.288,-0.33 -1.29,-0.325 -1.28,-0.324 -1.261,-0.32 -1.243,-0.314 -1.225,-0.305
  region: -1.375,-0.325 -1.374,-0.35 -1.374,-0.355 -1.445,-0.355 -1.447,-0.35 -1.438,-0.349 -1.419,-0.345 -1.4,-0.339 -1.383,-0.33
  region: -1.217,0.3 -1.217,0.325 -1.217,0.33 -1.288,0.33 -1.29,0.325 -1.28,0.324 -1.261,0.32 -1.243,0.314 -1.225,0.305
  region: -1.375,-0.53 -1.375,-0.35 -1.525,-0.35 -1.562,-0.384 -1.646,-0.44 -1.739,-0.478 -1.837,-0.498 -1.887,-0.5 -1.917,-0.5 -1.917,-0.53 -1.525,-0.53
  region: -1.375,0.53 -1.375,0.35 -1.525,0.35 -1.562,0.384 -1.646,0.44 -1.739,0.478 -1.837,0.498 -1.887,0.5 -1.917,0.5 -1.917,0.53 -1.525,0.53
  region: 1.831,-0.63 1.831,-0.701 1.277,-0.701 1.289,-0.666 1.301,-0.63
  region: 1.831,-0.97 1.831,-0.899 1.277,-0.899 1.289,-0.934 1.301,-0.97
  region: 0.3,-1.217 0.385,-1.217 0.385,-0.8 -0.41,-0.8 -0.41,-1.217 -0.3,-1.217 -0.3,-0.9 0.3,-0.9
  pour cut-out: 0.1,-1.277 0.3,-1.277 0.3,-0.9 -0.3,-0.9 -0.3,-1.277 -0.1,-1.277 -0.1,-1.099 0.014,-1.099 0.1,-1.099
  region: -0.5,-1.598 -0.547,-1.598 -0.547,-0.762 -0.5,-0.762
  region: -0.489,-1.527 -0.489,-1.584 -0.696,-1.584 -0.639,-1.527
  region: -0.17,-1.831 -0.099,-1.831 -0.099,-1.277 -0.135,-1.289 -0.17,-1.301
  region: 0.17,-1.831 0.099,-1.831 0.099,-1.277 0.134,-1.289 0.17,-1.301
  region: -0.5,-1.598 -0.547,-1.598 -0.547,-0.762 -0.5,-0.762
  region: 1.831,0.63 1.831,0.701 1.277,0.701 1.289,0.666 1.301,0.63
  region: 1.831,0.97 1.831,0.899 1.277,0.899 1.289,0.934 1.301,0.97
  pour cut-out: 1.277,-0.9 1.277,-1.1 0.9,-1.1 0.9,-0.5 1.277,-0.5 1.277,-0.7 1.099,-0.7 1.099,-0.814 1.099,-0.9
  region: 1.217,-1.1 1.217,-1.185 0.8,-1.185 0.8,-0.39 1.217,-0.39 1.217,-0.5 0.9,-0.5 0.9,-1.1
  pour cut-out: 1.277,0.7 1.277,0.5 0.9,0.5 0.9,1.1 1.277,1.1 1.277,0.9 1.099,0.9 1.099,0.786 1.099,0.7
  region: 1.217,0.5 1.217,0.415 0.8,0.415 0.8,1.21 1.217,1.21 1.217,1.1 0.9,1.1 0.9,0.5
  region: -0.5,1.598 -0.547,1.598 -0.547,0.762 -0.5,0.762
  region: 0.17,1.831 0.099,1.831 0.099,1.277 0.134,1.289 0.17,1.301
  region: -0.17,1.831 -0.099,1.831 -0.099,1.277 -0.135,1.289 -0.17,1.301
  region: -0.489,1.527 -0.489,1.584 -0.696,1.584 -0.639,1.527
  region: -0.5,1.598 -0.547,1.598 -0.547,0.762 -0.5,0.762
  pour cut-out: 0.1,1.277 0.3,1.277 0.3,0.9 -0.3,0.9 -0.3,1.277 -0.1,1.277 -0.1,1.099 0.014,1.099 0.1,1.099
  region: 0.3,1.217 0.385,1.217 0.385,0.8 -0.41,0.8 -0.41,1.217 -0.3,1.217 -0.3,0.9 0.3,0.9
  region: -1.217,0.3 -1.217,0.385 -0.8,0.385 -0.8,-0.41 -1.217,-0.41 -1.217,-0.3 -0.9,-0.3 -0.9,0.3
  pour cut-out: -1.277,0.1 -1.277,0.3 -0.9,0.3 -0.9,-0.3 -1.277,-0.3 -1.277,-0.1 -1.099,-0.1 -1.099,0.014 -1.099,0.1
  region: -1.598,-0.5 -1.598,-0.547 -0.762,-0.547 -0.762,-0.5
  region: -1.527,-0.489 -1.584,-0.489 -1.584,-0.932 -1.527,-0.875
  region: -1.831,-0.17 -1.831,-0.099 -1.277,-0.099 -1.289,-0.134 -1.301,-0.17
  region: -1.831,0.17 -1.831,0.099 -1.277,0.099 -1.289,0.134 -1.301,0.17
  region: -1.527,0.489 -1.584,0.489 -1.584,0.932 -1.527,0.875
  region: -1.598,-0.5 -1.598,-0.547 -0.762,-0.547 -0.762,-0.5
  region: -1.598,0.5 -1.598,0.547 -0.762,0.547 -0.762,0.5
  region: -1.354,-0.121 -1.354,0.111 -1.668,0.111 -1.668,-0.121
  region: -0.121,1.354 0.111,1.354 0.111,1.668 -0.121,1.668
  region: 0.121,-1.354 -0.111,-1.354 -0.111,-1.668 0.121,-1.668
  region: 1.354,0.921 1.354,0.689 1.668,0.689 1.668,0.921
  region: 1.354,-0.679 1.354,-0.911 1.668,-0.911 1.668,-0.679
Top Overlay:
  circle w0.25: c-2.15,1.5 r0.125
  lines w0.2: -1.65,-1.3 -1.65,-1.65 -1.3,-1.65 ; -1.65,1.3 -1.65,1.65 -1.3,1.65 ; 1.3,-1.65 1.65,-1.65 1.65,-1.3 ; 1.3,1.65 1.65,1.65 1.65,1.3
Top Paste:
  rectangle: 0.1,-0.7 0.7,-0.1
  rectangle: -0.7,-0.7 -0.1,-0.1
  rectangle: 0.1,0.1 0.7,0.7
  rectangle: -0.7,0.1 -0.1,0.7
Top Courtyard:
  lines w0.025: -1.95,-1.35 -1.95,1.35 -1.75,1.35 -1.75,1.75 -1.35,1.75 -1.35,1.95 1.15,1.95 1.15,1.75 1.75,1.75 1.75,1.15 1.95,1.15 1.95,-1.15 1.75,-1.15 1.75,-1.75 1.15,-1.75 1.15,-1.95 -1.35,-1.95 -1.35,-1.75 -1.75,-1.75 -1.75,-1.35 -1.95,-1.35
Top Assembly:
  circle w0.05: c-1.1,1.1 r0.2
  lines w0.05: -1.5,-1.5 -1.5,1.5 1.5,1.5 1.5,-1.5 -1.5,-1.5
  text ".Designator" at -4.511,-0.453 h2
3D body "CC-20-6(LGA20).x_t": height 0.86, standoff -0.01, extent -1.5,-1.5 1.5,1.5

## LGA-20(CC-20-19) [mm] "LGA, 20-Leads, Body 3x3mm, Pitch 0.40mm, Thermal Pad 1.60x1.60mm"
height 0.73
pads (21):
  rect 0.275x0.2 smd paste+0.01 mask+0.05: 1(-1.237,0.8) 3(-1.237,0) 5(-1.237,-0.8) 11(1.237,-0.8) 13(1.237,0) 15(1.237,0.8)
  rect 0.275x0.15 smd paste+0.01 mask+0.05: 2(-1.237,0.4) 4(-1.237,-0.4) 12(1.237,-0.4) 14(1.237,0.4)
  rect 0.2x0.275 smd paste+0.01 mask+0.05: 6(-0.8,-1.237) 8(0,-1.237) 10(0.8,-1.237) 16(0.8,1.237) 18(0,1.237) 20(-0.8,1.237)
  rect 0.15x0.275 smd paste+0.01 mask+0.05: 7(-0.4,-1.237) 9(0.4,-1.237) 17(0.4,1.237) 19(-0.4,1.237)
  rect 1.7x1.7 smd paste-4 mask+0.05: EP(0,0)
Top Layer:
  region: -0.8,1.099 -0.8,1.375 -0.947,1.374 -0.947,1.1
  region: -0.8,-1.375 -0.8,-1.099 -0.947,-1.1 -0.947,-1.374
  region: -1.099,-0.8 -1.375,-0.8 -1.374,-0.947 -1.1,-0.947
  region: -1.1,0.8 -1.375,0.8 -1.375,0.947 -1.1,0.947
  region: -1.58,0.099 -1.277,0.099 -1.301,0.17 -1.58,0.17
  region: -1.58,-0.099 -1.277,-0.099 -1.301,-0.17 -1.58,-0.17
  region: -0.099,-1.58 -0.099,-1.277 -0.17,-1.301 -0.17,-1.58
  region: 0.099,-1.58 0.099,-1.277 0.17,-1.301 0.17,-1.58
  region: 1.58,-0.899 1.277,-0.899 1.301,-0.97 1.58,-0.97
  region: 1.58,-0.701 1.277,-0.701 1.301,-0.63 1.58,-0.63
  region: 1.58,0.701 1.277,0.701 1.301,0.63 1.58,0.63
  region: 1.58,0.899 1.277,0.899 1.301,0.97 1.58,0.97
  region: 0.099,1.58 0.099,1.277 0.17,1.301 0.17,1.58
  region: 0.111,1.58 0.111,1.354 -0.121,1.354 -0.121,1.58
  region: -0.099,1.58 -0.099,1.277 -0.17,1.301 -0.17,1.58
  region: -1.58,0.111 -1.354,0.111 -1.354,-0.121 -1.58,-0.121
  region: -0.111,-1.58 -0.111,-1.354 0.121,-1.354 0.121,-1.58
  region: 1.58,-0.911 1.354,-0.911 1.354,-0.679 1.58,-0.679
  region: 1.58,0.689 1.354,0.689 1.354,0.921 1.58,0.921
Top Overlay:
  circle w0.25: c-2.15,1.5 r0.125
  lines w0.2: -1.65,-1.3 -1.65,-1.65 -1.3,-1.65 ; -1.65,1.3 -1.65,1.65 -1.3,1.65 ; 1.3,-1.65 1.65,-1.65 1.65,-1.3 ; 1.3,1.65 1.65,1.65 1.65,1.3
Top Paste:
  drawing of 90 lines, arcs and shapes, not listed
Top Solder:
  region: -0.275,1.354 -0.525,1.354 -0.525,1.65 -0.275,1.65
  region: 0.525,1.354 0.275,1.354 0.275,1.65 0.525,1.65
  region: -0.932,1.65 -1.132,1.65 -1.132,1.35 -0.932,1.35
  region: -0.65,1.354 -0.95,1.354 -0.95,1.65 -0.65,1.65
  region: 0.95,1.354 0.65,1.354 0.65,1.65 0.95,1.65
  region: 0.15,1.354 -0.15,1.354 -0.15,1.65 0.15,1.65
  region: 1.354,0.65 1.354,0.95 1.65,0.95 1.65,0.65
  region: 1.354,0.275 1.354,0.525 1.65,0.525 1.65,0.275
  region: 1.354,-0.525 1.354,-0.275 1.65,-0.275 1.65,-0.525
  region: 1.354,-0.95 1.354,-0.65 1.65,-0.65 1.65,-0.95
  region: 1.354,-0.15 1.354,0.15 1.65,0.15 1.65,-0.15
  region: -1.354,0.15 -1.354,-0.15 -1.65,-0.15 -1.65,0.15
  region: -0.932,-1.65 -1.132,-1.65 -1.132,-1.35 -0.932,-1.35
  region: -1.65,-0.95 -1.65,-1.15 -1.35,-1.15 -1.35,-0.95
  region: -1.65,0.95 -1.65,1.15 -1.35,1.15 -1.35,0.95
  region: -1.354,0.95 -1.354,0.65 -1.65,0.65 -1.65,0.95
  region: 0.65,-1.354 0.95,-1.354 0.95,-1.65 0.65,-1.65
  region: 0.275,-1.354 0.525,-1.354 0.525,-1.65 0.275,-1.65
  region: -0.15,-1.354 0.15,-1.354 0.15,-1.65 -0.15,-1.65
  region: -0.525,-1.354 -0.275,-1.354 -0.275,-1.65 -0.525,-1.65
  region: -0.95,-1.354 -0.65,-1.354 -0.65,-1.65 -0.95,-1.65
  region: -1.354,-0.275 -1.354,-0.525 -1.65,-0.525 -1.65,-0.275
  region: -1.354,-0.65 -1.354,-0.95 -1.65,-0.95 -1.65,-0.65
  region: -1.354,0.525 -1.354,0.275 -1.65,0.275 -1.65,0.525
Top Courtyard:
  lines w0.025: -1.95,-1.35 -1.95,1.35 -1.75,1.35 -1.75,1.75 -1.35,1.75 -1.35,1.95 1.15,1.95 1.15,1.75 1.75,1.75 1.75,1.15 1.95,1.15 1.95,-1.15 1.75,-1.15 1.75,-1.75 1.15,-1.75 1.15,-1.95 -1.35,-1.95 -1.35,-1.75 -1.75,-1.75 -1.75,-1.35 -1.95,-1.35
Top Assembly:
  circle w0.05: c-1.1,1.1 r0.2
  lines w0.05: -1.5,-1.5 -1.5,1.5 1.5,1.5 1.5,-1.5 -1.5,-1.5
  text ".Designator" at -4.511,-0.453 h2
3D body "CC-20-19(LGA20).x_t": height 0.73, standoff -0.01, extent -1.5,-1.5 1.5,1.5

## LGA-24(CC-24-5) [mm] "LGA, 24-Leads, Body 4x4mm, Pitch 0.50mm, Thermal Pad 2.50x2.50mm"
height 0.75
pads (25):
  rect 0.5x0.25 smd mask+0.05: 1(-1.85,1.25) 2(-1.85,0.75) 3(-1.85,0.25) 4(-1.85,-0.25) 6(-1.85,-1.25) 13(1.85,-1.25) 15(1.85,-0.25) 16(1.85,0.25) 17(1.85,0.75) 18(1.85,1.25)
  rect 0.56x0.25 smd paste-5 mask+0.05: 5(-1.88,-0.75) 14(1.88,-0.75)
  rect 0.25x0.5 smd mask+0.05: 7(-1.25,-1.85) 8(-0.75,-1.85) 9(-0.25,-1.85) 10(0.25,-1.85) 11(0.75,-1.85) 12(1.25,-1.85) 19(1.25,1.85) 20(0.75,1.85) 21(0.25,1.85) 22(-0.25,1.85) 23(-0.75,1.85) 24(-1.25,1.85)
  rect 2.4x2.4 smd paste-5: EP(0,0)
Top Layer:
  region: 2.18,-0.625 2.055,-0.625 2.055,-0.875 2.18,-0.875
  rectangle: -2.18,-0.875 -2.055,-0.625
  region: 2.36,-0.58 2.16,-0.58 2.16,-0.92 2.36,-0.92
  rectangle: -2.36,-0.92 -2.16,-0.58
Top Overlay:
  circle w0.25: c-2.8,2 r0.125
  lines w0.2: -2.26,-2.035 -2.26,-2.26 -2.035,-2.26 ; -2.26,2.035 -2.26,2.26 -2.035,2.26 ; 2.035,-2.26 2.26,-2.26 2.26,-2.035 ; 2.035,2.26 2.26,2.26 2.26,2.035
Top Paste:
  region: -1.375,2.2 -1.375,2.05 -1.125,2.05 -1.125,2.2
  region: -0.875,2.2 -0.875,2.05 -0.625,2.05 -0.625,2.2
  region: -0.375,2.2 -0.375,2.05 -0.125,2.05 -0.125,2.2
  region: 0.125,2.2 0.125,2.05 0.375,2.05 0.375,2.2
  region: 0.625,2.2 0.625,2.05 0.875,2.05 0.875,2.2
  region: 1.125,2.2 1.125,2.05 1.375,2.05 1.375,2.2
  region: 2.2,1.375 2.05,1.375 2.05,1.125 2.2,1.125
  region: 2.2,0.875 2.05,0.875 2.05,0.625 2.2,0.625
  region: 2.2,0.375 2.05,0.375 2.05,0.125 2.2,0.125
  region: 2.2,-0.125 2.05,-0.125 2.05,-0.375 2.2,-0.375
  region: 2.23,-0.625 2.08,-0.625 2.08,-0.875 2.23,-0.875
  region: 2.2,-1.125 2.05,-1.125 2.05,-1.375 2.2,-1.375
  region: 1.375,-2.2 1.375,-2.05 1.125,-2.05 1.125,-2.2
  region: 0.875,-2.2 0.875,-2.05 0.625,-2.05 0.625,-2.2
  region: 0.375,-2.2 0.375,-2.05 0.125,-2.05 0.125,-2.2
  region: -0.125,-2.2 -0.125,-2.05 -0.375,-2.05 -0.375,-2.2
  region: -0.125,-2.2 -0.125,-2.05 -0.375,-2.05 -0.375,-2.2
  region: -0.625,-2.2 -0.625,-2.05 -0.875,-2.05 -0.875,-2.2
  region: -1.125,-2.2 -1.125,-2.05 -1.375,-2.05 -1.375,-2.2
  rectangle: -2.2,-1.375 -2.05,-1.125
  rectangle: -2.23,-0.875 -2.08,-0.625
  rectangle: -2.2,-0.375 -2.05,-0.125
  rectangle: -2.2,0.125 -2.05,0.375
  rectangle: -2.2,0.625 -2.05,0.875
  rectangle: -2.2,1.125 -2.05,1.375
  rectangle: 0.5,0.5 1.1,1.1
  rectangle: -0.3,0.5 0.3,1.1
  rectangle: 0.5,-1.1 1.1,-0.5
  rectangle: -0.3,-1.1 0.3,-0.5
  rectangle: 0.5,-0.3 1.1,0.3
  rectangle: -0.3,-0.3 0.3,0.3
  region: -0.5,1.1 -1.1,1.1 -1.1,0.5 -0.5,0.5
  region: -0.5,-0.5 -1.1,-0.5 -1.1,-1.1 -0.5,-1.1
  region: -0.5,0.3 -1.1,0.3 -1.1,-0.3 -0.5,-0.3
  rectangle: -2.1,-0.375 -1.601,-0.126
  rectangle: -2.1,-0.875 -1.601,-0.626
  region: 2.1,-0.626 1.601,-0.626 1.601,-0.875 2.1,-0.875
Top Solder:
  region: -1.425,2.25 -1.425,2.114 -1.075,2.114 -1.075,2.25
  region: -0.925,2.25 -0.925,2.114 -0.575,2.114 -0.575,2.25
  region: -0.425,2.25 -0.425,2.114 -0.075,2.114 -0.075,2.25
  region: 0.075,2.25 0.075,2.114 0.425,2.114 0.425,2.25
  region: 0.575,2.25 0.575,2.114 0.925,2.114 0.925,2.25
  region: 1.075,2.25 1.075,2.114 1.425,2.114 1.425,2.25
  region: 2.25,1.425 2.114,1.425 2.114,1.075 2.25,1.075
  region: 2.25,0.925 2.114,0.925 2.114,0.575 2.25,0.575
  region: 2.25,0.425 2.114,0.425 2.114,0.075 2.25,0.075
  region: 2.25,-0.075 2.114,-0.075 2.114,-0.425 2.25,-0.425
  region: 2.28,-0.575 2.144,-0.575 2.144,-0.925 2.28,-0.925
  region: 2.25,-1.075 2.114,-1.075 2.114,-1.425 2.25,-1.425
  region: 1.425,-2.25 1.425,-2.114 1.075,-2.114 1.075,-2.25
  region: 0.925,-2.25 0.925,-2.114 0.575,-2.114 0.575,-2.25
  region: 0.425,-2.25 0.425,-2.114 0.075,-2.114 0.075,-2.25
  region: -0.075,-2.25 -0.075,-2.114 -0.425,-2.114 -0.425,-2.25
  region: -0.575,-2.25 -0.575,-2.114 -0.925,-2.114 -0.925,-2.25
  region: -1.075,-2.25 -1.075,-2.114 -1.425,-2.114 -1.425,-2.25
  rectangle: -2.25,-1.425 -2.114,-1.075
  rectangle: -2.28,-0.925 -2.144,-0.575
  rectangle: -2.25,-0.425 -2.114,-0.075
  rectangle: -2.25,0.075 -2.114,0.425
  rectangle: -2.25,0.575 -2.114,0.925
  rectangle: -2.25,1.075 -2.114,1.425
Top Courtyard:
  lines w0.025: -2.6,-1.65 -2.6,1.65 -2.25,1.65 -2.25,2.25 -1.65,2.25 -1.65,2.6 1.65,2.6 1.65,2.25 2.25,2.25 2.25,1.65 2.6,1.65 2.6,-1.65 2.25,-1.65 2.25,-2.25 1.65,-2.25 1.65,-2.6 -1.65,-2.6 -1.65,-2.25 -2.25,-2.25 -2.25,-1.65 -2.6,-1.65
Top Assembly:
  lines w0.1: -1.021,1.436 ccw(c-1.34,1.41) -1.02,1.404 ; -2.05,-2.05 2.05,-2.05 2.05,2.05 -2.05,2.05 -2.05,-2.05
  text ".Designator" at -4.511,-0.453 h2
3D body "CC-24-5(LGA24).x_t": height 0.75, standoff -0.01, extent -2,-2 2,2

## LGA-24(CC-24-5)_0305 [mm] "LGA, 24-Leads, Body 4x4mm, Pitch 0.50mm, Thermal Pad 2.50x2.50mm"
height 0.75
pads (25):
  rect 0.44x0.25 smd mask+0.05: 1(-1.82,1.25) 2(-1.82,0.75) 3(-1.82,0.25) 4(-1.82,-0.25) 5(-1.82,-0.75) 6(-1.82,-1.25) 13(1.82,-1.25) 14(1.82,-0.75) 15(1.82,-0.25) 16(1.82,0.25) 17(1.82,0.75) 18(1.82,1.25)
  rect 0.25x0.44 smd mask+0.05: 7(-1.25,-1.82) 8(-0.75,-1.82) 9(-0.25,-1.82) 10(0.25,-1.82) 11(0.75,-1.82) 12(1.25,-1.82) 19(1.25,1.82) 20(0.75,1.82) 21(0.25,1.82) 22(-0.25,1.82) 23(-0.75,1.82) 24(-1.25,1.82)
  rect 2.4x2.4 smd paste-5: EP(0,0)
Top Overlay:
  circle w0.25: c-2.8,2 r0.125
  lines w0.2: -2.26,-2.035 -2.26,-2.26 -2.035,-2.26 ; -2.26,2.035 -2.26,2.26 -2.035,2.26 ; 2.035,-2.26 2.26,-2.26 2.26,-2.035 ; 2.035,2.26 2.26,2.26 2.26,2.035
Top Paste:
  region: -0.5,0.3 -1.1,0.3 -1.1,-0.3 -0.5,-0.3
  region: -0.5,-0.5 -1.1,-0.5 -1.1,-1.1 -0.5,-1.1
  region: -0.5,1.1 -1.1,1.1 -1.1,0.5 -0.5,0.5
  rectangle: -0.3,-0.3 0.3,0.3
  rectangle: 0.5,-0.3 1.1,0.3
  rectangle: -0.3,-1.1 0.3,-0.5
  rectangle: 0.5,-1.1 1.1,-0.5
  rectangle: -0.3,0.5 0.3,1.1
  rectangle: 0.5,0.5 1.1,1.1
Top Courtyard:
  lines w0.025: -2.6,-1.65 -2.25,-1.65 -2.25,-2.25 -1.65,-2.25 -1.65,-2.6 1.65,-2.6 1.65,-2.25 2.25,-2.25 2.25,-1.65 2.6,-1.65 2.6,1.65 2.25,1.65 2.25,2.25 1.65,2.25 1.65,2.6 -1.65,2.6 -1.65,2.25 -2.25,2.25 -2.25,1.65 -2.6,1.65 -2.6,-1.65
Top Assembly:
  lines w0.1: -1.021,1.436 ccw(c-1.34,1.41) -1.02,1.404 ; -2.05,-2.05 -2.05,2.05 2.05,2.05 2.05,-2.05 -2.05,-2.05
  text ".Designator" at -4.511,-0.453 h2
3D body "CC-24-5(LGA24).x_t": height 0.75, standoff -0.01, extent -2,-2 2,2

## LGA-24(CC-24-12) [mm] "LGA, 24-Leads, Body 3x3mm, Pitch 0.40mm, Thermal Pad 1.50x1.50mm"
height 0.738
pads (25):
  rect 0.33x0.2 smd mask+0.05: 1(-1.21,1.2) 2(-1.21,0.8) 4(-1.21,0) 6(-1.21,-0.8) 7(-1.21,-1.2) 14(1.21,-0.8) 16(1.21,0) 18(1.21,0.8)
  rect 0.32x0.2 smd mask+0.05: 3(-1.205,0.4) 5(-1.205,-0.4) 13(1.205,-1.2) 15(1.205,-0.4) 17(1.205,0.4) 19(1.205,1.2)
  rect 0.2x0.33 smd mask+0.05: 8(-0.8,-1.21) 10(0,-1.21) 12(0.8,-1.21) 20(0.8,1.21) 22(0,1.21) 24(-0.8,1.21)
  rect 0.2x0.32 smd mask+0.05: 9(-0.4,-1.205) 11(0.4,-1.205) 21(0.4,1.205) 23(-0.4,1.205)
  rect 1.5x1.5 smd paste-4 mask+0.1: EP(0,0)
Top Layer:
  region: -0.17,-1.519 -0.1,-1.439 -0.1,-1.37 0.1,-1.37 0.1,-1.439 0.17,-1.519 0.17,-1.613 -0.17,-1.613
  region: 1.519,-0.97 1.439,-0.9 1.37,-0.9 1.37,-0.7 1.439,-0.7 1.519,-0.63 1.613,-0.63 1.613,-0.97
  region: 1.519,0.63 1.439,0.7 1.37,0.7 1.37,0.9 1.439,0.9 1.519,0.97 1.613,0.97 1.613,0.63
  region: 0.17,1.519 0.1,1.439 0.1,1.37 -0.1,1.37 -0.1,1.439 -0.17,1.519 -0.17,1.613 0.17,1.613
  region: -1.519,0.17 -1.439,0.1 -1.37,0.1 -1.37,-0.1 -1.439,-0.1 -1.519,-0.17 -1.613,-0.17 -1.613,0.17
Top Overlay:
  circle w0.25: c-2.25,1.55 r0.125
  lines w0.2: -1.64,-1.474 -1.64,-1.64 -1.19,-1.64 ; -1.64,1.474 -1.64,1.64 -1.19,1.64 ; 1.19,-1.64 1.64,-1.64 1.64,-1.474 ; 1.19,1.64 1.64,1.64 1.64,1.474
Top Paste:
  rectangle: 0.1,-0.7 0.7,-0.1
  rectangle: -0.7,-0.7 -0.1,-0.1
  rectangle: 0.1,0.1 0.7,0.7
  rectangle: -0.7,0.1 -0.1,0.7
Top Courtyard:
  lines w0.025: -2,-1.55 -2,1.55 -1.7,1.55 -1.7,1.7 -1.15,1.7 -1.15,2 1.15,2 1.15,1.7 1.7,1.7 1.7,1.55 2,1.55 2,-1.55 1.7,-1.55 1.7,-1.7 1.15,-1.7 1.15,-2 -1.15,-2 -1.15,-1.7 -1.7,-1.7 -1.7,-1.55 -2,-1.55
Top Assembly:
  lines w0.05: -1.014,1.221 ccw(c-1.2,1.2) -1.013,1.19 ; -1.5,-1.5 1.5,-1.5 1.5,1.5 -1.5,1.5 -1.5,-1.5
  text ".Designator" at -4.511,-0.453 h2
3D body "CC-24-12(LGA24).x_t": height 0.74, standoff -0.01, extent -1.5,-1.5 1.5,1.5

## LGA-24(CC-24-14) [mm] "LGA, 24-Leads, Body 3x3mm, Pitch 0.40mm, Thermal Pad 1.50x1.50mm"
height 0.778
pads (25):
  rect 0.33x0.2 smd mask+0.05: 1(-1.21,1.2) 2(-1.21,0.8) 4(-1.21,0) 6(-1.21,-0.8) 7(-1.21,-1.2) 14(1.21,-0.8) 16(1.21,0) 18(1.21,0.8)
  rect 0.32x0.2 smd mask+0.05: 3(-1.205,0.4) 5(-1.205,-0.4) 13(1.205,-1.2) 15(1.205,-0.4) 17(1.205,0.4) 19(1.205,1.2)
  rect 0.2x0.33 smd mask+0.05: 8(-0.8,-1.21) 10(0,-1.21) 12(0.8,-1.21) 20(0.8,1.21) 22(0,1.21) 24(-0.8,1.21)
  rect 0.2x0.32 smd mask+0.05: 9(-0.4,-1.205) 11(0.4,-1.205) 21(0.4,1.205) 23(-0.4,1.205)
  rect 1.5x1.5 smd paste-4 mask+0.1: EP(0,0)
Top Layer:
  region: -0.17,-1.519 -0.1,-1.439 -0.1,-1.37 0.1,-1.37 0.1,-1.439 0.17,-1.519 0.17,-1.613 -0.17,-1.613
  region: 1.519,-0.97 1.439,-0.9 1.37,-0.9 1.37,-0.7 1.439,-0.7 1.519,-0.63 1.613,-0.63 1.613,-0.97
  region: 1.519,0.63 1.439,0.7 1.37,0.7 1.37,0.9 1.439,0.9 1.519,0.97 1.613,0.97 1.613,0.63
  region: 0.17,1.519 0.1,1.439 0.1,1.37 -0.1,1.37 -0.1,1.439 -0.17,1.519 -0.17,1.613 0.17,1.613
  region: -1.519,0.17 -1.439,0.1 -1.37,0.1 -1.37,-0.1 -1.439,-0.1 -1.519,-0.17 -1.613,-0.17 -1.613,0.17
Top Overlay:
  circle w0.25: c-2.25,1.55 r0.125
  lines w0.2: -1.64,-1.474 -1.64,-1.64 -1.19,-1.64 ; -1.64,1.474 -1.64,1.64 -1.19,1.64 ; 1.19,-1.64 1.64,-1.64 1.64,-1.474 ; 1.19,1.64 1.64,1.64 1.64,1.474
Top Paste:
  rectangle: 0.1,-0.7 0.7,-0.1
  rectangle: -0.7,-0.7 -0.1,-0.1
  rectangle: 0.1,0.1 0.7,0.7
  rectangle: -0.7,0.1 -0.1,0.7
  region: -1.375,0.9 -1.375,0.7 -1.475,0.7 -1.475,0.9
  region: -1.375,1.3 -1.375,1.1 -1.475,1.1 -1.475,1.3
  region: -1.365,0.5 -1.365,0.3 -1.465,0.3 -1.465,0.5
  region: -1.37,0.1 -1.37,-0.1 -1.47,-0.1 -1.47,0.1
  region: -1.365,-0.3 -1.365,-0.5 -1.465,-0.5 -1.465,-0.3
  region: -1.375,-0.7 -1.375,-0.9 -1.475,-0.9 -1.475,-0.7
  region: -1.375,-1.1 -1.375,-1.3 -1.475,-1.3 -1.475,-1.1
  region: -0.9,-1.375 -0.7,-1.375 -0.7,-1.475 -0.9,-1.475
  region: -0.5,-1.365 -0.3,-1.365 -0.3,-1.465 -0.5,-1.465
  region: -0.1,-1.375 0.1,-1.375 0.1,-1.475 -0.1,-1.475
  region: 0.3,-1.365 0.5,-1.365 0.5,-1.465 0.3,-1.465
  region: 0.7,-1.375 0.9,-1.375 0.9,-1.475 0.7,-1.475
  region: 1.365,-1.3 1.365,-1.1 1.465,-1.1 1.465,-1.3
  region: 1.375,-0.9 1.375,-0.7 1.475,-0.7 1.475,-0.9
  region: 1.365,-0.5 1.365,-0.3 1.465,-0.3 1.465,-0.5
  region: 1.375,-0.1 1.375,0.1 1.475,0.1 1.475,-0.1
  region: 1.365,0.3 1.365,0.5 1.465,0.5 1.465,0.3
  region: 1.375,0.7 1.375,0.9 1.475,0.9 1.475,0.7
  region: 1.365,1.1 1.365,1.3 1.465,1.3 1.465,1.1
  region: 0.9,1.375 0.7,1.375 0.7,1.475 0.9,1.475
  region: 0.5,1.365 0.3,1.365 0.3,1.465 0.5,1.465
  region: 0.1,1.375 -0.1,1.375 -0.1,1.475 0.1,1.475
  region: -0.3,1.365 -0.5,1.365 -0.5,1.465 -0.3,1.465
  region: -0.7,1.375 -0.9,1.375 -0.9,1.475 -0.7,1.475
Top Solder:
  region: -0.55,-1.41 -0.55,-1.8 -0.25,-1.8 -0.25,-1.41
  region: -0.95,-1.415 -0.95,-1.805 -0.65,-1.805 -0.65,-1.415
  region: -1.415,-1.05 -1.805,-1.05 -1.805,-1.35 -1.415,-1.35
  region: -1.415,-0.65 -1.805,-0.65 -1.805,-0.95 -1.415,-0.95
  region: -1.415,1.35 -1.805,1.35 -1.805,1.05 -1.415,1.05
  region: -0.15,-1.424 -0.15,-1.8 0.15,-1.8 0.15,-1.424
  region: 0.25,-1.41 0.25,-1.8 0.55,-1.8 0.55,-1.41
  region: 0.65,-1.415 0.65,-1.805 0.95,-1.805 0.95,-1.415
  region: -1.424,0.15 -1.8,0.15 -1.8,-0.15 -1.424,-0.15
  region: -1.41,0.55 -1.8,0.55 -1.8,0.25 -1.41,0.25
  region: -1.41,-0.25 -1.8,-0.25 -1.8,-0.55 -1.41,-0.55
  region: -1.415,0.95 -1.805,0.95 -1.805,0.65 -1.415,0.65
  region: 1.424,0.15 1.8,0.15 1.8,-0.15 1.424,-0.15
  region: 1.41,0.55 1.8,0.55 1.8,0.25 1.41,0.25
  region: 1.41,-0.25 1.8,-0.25 1.8,-0.55 1.41,-0.55
  region: 1.415,0.95 1.805,0.95 1.805,0.65 1.415,0.65
  region: 1.415,-0.65 1.805,-0.65 1.805,-0.95 1.415,-0.95
  region: -0.15,1.424 -0.15,1.8 0.15,1.8 0.15,1.424
  region: -0.55,1.41 -0.55,1.8 -0.25,1.8 -0.25,1.41
  region: 0.25,1.41 0.25,1.8 0.55,1.8 0.55,1.41
  region: -0.95,1.415 -0.95,1.805 -0.65,1.805 -0.65,1.415
  region: 0.65,1.415 0.65,1.805 0.95,1.805 0.95,1.415
  region: 1.415,1.35 1.805,1.35 1.805,1.05 1.415,1.05
  region: 1.415,-1.05 1.805,-1.05 1.805,-1.35 1.415,-1.35
Top Courtyard:
  lines w0.025: -2,-1.55 -2,1.55 -1.7,1.55 -1.7,1.7 -1.15,1.7 -1.15,2 1.15,2 1.15,1.7 1.7,1.7 1.7,1.55 2,1.55 2,-1.55 1.7,-1.55 1.7,-1.7 1.15,-1.7 1.15,-2 -1.15,-2 -1.15,-1.7 -1.7,-1.7 -1.7,-1.55 -2,-1.55
Top Assembly:
  lines w0.05: -1.014,1.221 ccw(c-1.2,1.2) -1.013,1.19 ; -1.5,-1.5 1.5,-1.5 1.5,1.5 -1.5,1.5 -1.5,-1.5
  text ".Designator" at -4.511,-0.453 h2
3D body "CC-24-14(LGA24).x_t": height 0.78, standoff -0.01, extent -1.5,-1.5 1.5,1.5